# Altium schematic symbol library 5708-RC.SchLib: 1 symbol
Pins are listed as number, name and electrical type; pins without a type are passive.

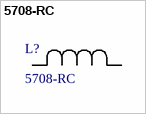
[diagram p0: symbol 5708-RC]

## 5708-RC
designator L?
Description; Manufacturer_Name: Bourns Electronics; Copyright: Copyright (C) 2026 Ultra Librarian. All rights reserved.; Manufacturer_Part_Number: 5708-RC
footprint IND_BOURNS_5708
pins: 1, 2